# Altium footprint library Connector.PcbLib: 272 footprints (part 11 of 17)
Each footprint in its own frame and in the unit in brackets; x right, y up, seen from the top. Pads: shape width x height; smd on the part's side, far side on the other; paste and mask are expansions set on the pad; w line width, h text height; cw(c..) or ccw(c..) is an arc to the next point about the centre after c.
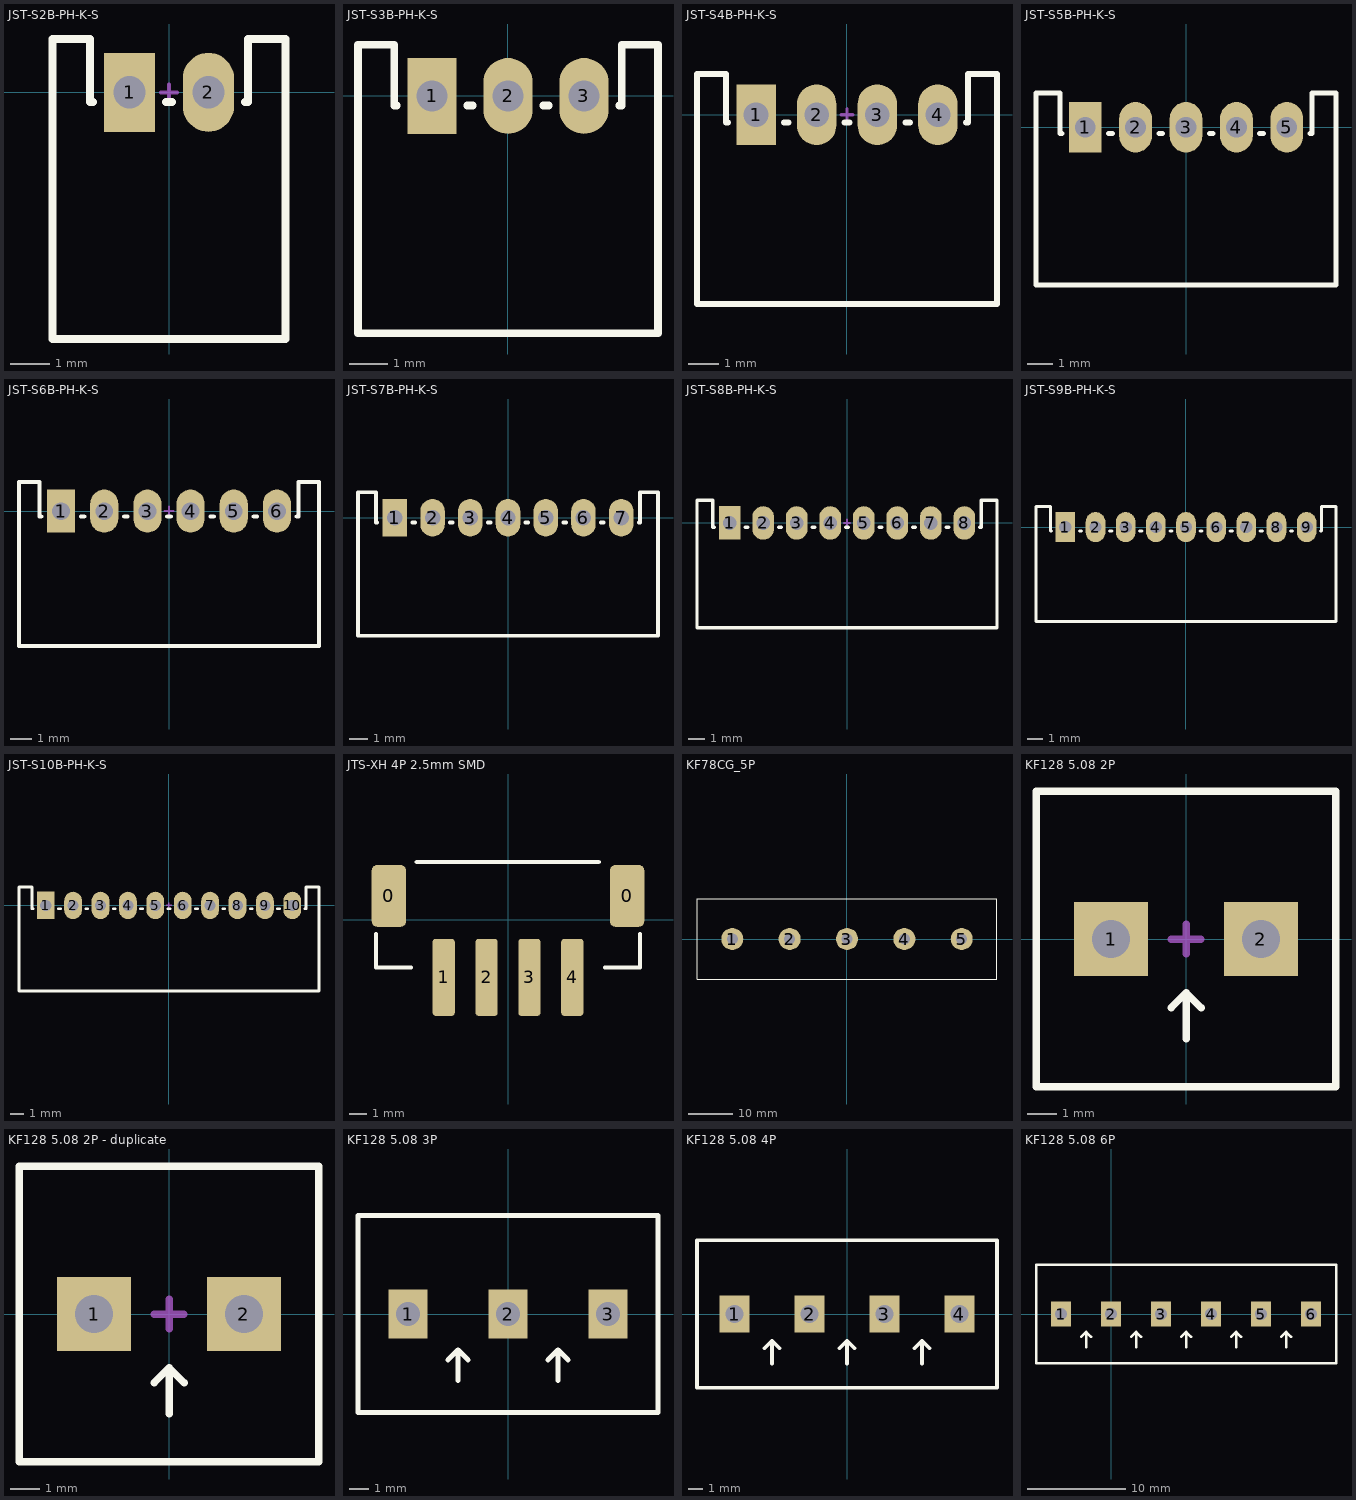
[diagram p10: the footprints below, top view; thin cyan lines are the x and y axes]

## JST-S2B-PH-K-S [mm]
pads (2):
  rect 1.3x2 hole 0.82: 1(-1,0)
  oval 1.3x2 hole 0.82: 2(1,0)
Top Overlay:
  lines w0.2: -1.925,-0.25 -2,-0.25 -2,1.35 -2.95,1.35 -2.95,-6.25 2.95,-6.25 2.95,1.35 2,1.35 2,-0.25 1.925,-0.25 ; -0.075,-0.25 0.075,-0.25
Top Designator:
  text ".Designator" at -3.71,-2.794 h1.52
Mechanical 15:
  lines w0.1: -0.2,0 0.2,0 ; 0,-0.2 0,0.2
3D body "JST-S2B-PH-K-S.STEP": height 4.81, standoff -3.39, extent -2.95,-6.25 2.95,1.35

## JST-S3B-PH-K-S [mm]
pads (3):
  rect 1.3x2 hole 0.82: 1(-2,0)
  oval 1.3x2 hole 0.82: 2(0,0) 3(2,0)
Top Overlay:
  lines w0.2: -2.925,-0.25 -3,-0.25 -3,1.35 -3.95,1.35 -3.95,-6.25 3.95,-6.25 3.95,1.35 3,1.35 3,-0.25 2.925,-0.25 ; -1.075,-0.25 -0.925,-0.25 ; 0.925,-0.25 1.075,-0.25
Top Designator:
  text ".Designator" at -3.71,-2.794 h1.52
Mechanical 15:
  lines w0.1: -0.2,0 0.2,0 ; 0,-0.2 0,0.2
3D body "JST-S3B-PH-K-S.STEP": height 4.81, standoff -3.39, extent -3.95,-6.25 3.95,1.35

## JST-S4B-PH-K-S [mm]
pads (4):
  rect 1.3x2 hole 0.82: 1(-3,0)
  oval 1.3x2 hole 0.82: 2(-1,0) 3(1,0) 4(3,0)
Top Overlay:
  lines w0.2: -3.925,-0.25 -4,-0.25 -4,1.35 -4.95,1.35 -4.95,-6.25 4.95,-6.25 4.95,1.35 4,1.35 4,-0.25 3.925,-0.25 ; -2.075,-0.25 -1.925,-0.25 ; -0.075,-0.25 0.075,-0.25 ; 1.925,-0.25 2.075,-0.25
Top Designator:
  text ".Designator" at -3.71,-2.794 h1.52
Mechanical 15:
  lines w0.1: -0.2,0 0.2,0 ; 0,-0.2 0,0.2
3D body "JST-S4B-PH-K-S.STEP": height 4.81, standoff -3.39, extent -4.95,-6.25 4.95,1.35

## JST-S5B-PH-K-S [mm]
pads (5):
  rect 1.3x2 hole 0.82: 1(-4,0)
  oval 1.3x2 hole 0.82: 2(-2,0) 3(0,0) 4(2,0) 5(4,0)
Top Overlay:
  lines w0.2: -4.925,-0.25 -5,-0.25 -5,1.35 -5.95,1.35 -5.95,-6.25 5.95,-6.25 5.95,1.35 5,1.35 5,-0.25 4.925,-0.25 ; -3.075,-0.25 -2.925,-0.25 ; -1.075,-0.25 -0.925,-0.25 ; 0.925,-0.25 1.075,-0.25 ; 2.925,-0.25 3.075,-0.25
Top Designator:
  text ".Designator" at -3.71,-2.794 h1.52
Mechanical 15:
  lines w0.1: -0.2,0 0.2,0 ; 0,-0.2 0,0.2
3D body "JST-S5B-PH-K-S.STEP": height 4.81, standoff -3.39, extent -5.95,-6.25 5.95,1.35

## JST-S6B-PH-K-S [mm]
pads (6):
  rect 1.3x2 hole 0.82: 1(-5,0)
  oval 1.3x2 hole 0.82: 2(-3,0) 3(-1,0) 4(1,0) 5(3,0) 6(5,0)
Top Overlay:
  lines w0.2: -5.925,-0.25 -6,-0.25 -6,1.35 -6.95,1.35 -6.95,-6.25 6.95,-6.25 6.95,1.35 6,1.35 6,-0.25 5.925,-0.25 ; -4.075,-0.25 -3.925,-0.25 ; -2.075,-0.25 -1.925,-0.25 ; -0.075,-0.25 0.075,-0.25 ; 1.925,-0.25 2.075,-0.25 ; 3.925,-0.25 4.075,-0.25
Top Designator:
  text ".Designator" at -3.71,-2.794 h1.52
Mechanical 15:
  lines w0.1: -0.2,0 0.2,0 ; 0,-0.2 0,0.2
3D body "JST-S6B-PH-K-S.STEP": height 4.81, standoff -3.39, extent -6.95,-6.25 6.95,1.35

## JST-S7B-PH-K-S [mm]
pads (7):
  rect 1.3x2 hole 0.82: 1(-6,0)
  oval 1.3x2 hole 0.82: 2(-4,0) 3(-2,0) 4(0,0) 5(2,0) 6(4,0) 7(6,0)
Top Overlay:
  lines w0.2: -6.925,-0.25 -7,-0.25 -7,1.35 -7.95,1.35 -7.95,-6.25 7.95,-6.25 7.95,1.35 7,1.35 7,-0.25 6.925,-0.25 ; -5.075,-0.25 -4.925,-0.25 ; -3.075,-0.25 -2.925,-0.25 ; -1.075,-0.25 -0.925,-0.25 ; 0.925,-0.25 1.075,-0.25 ; 2.925,-0.25 3.075,-0.25 ; 4.925,-0.25 5.075,-0.25
Top Designator:
  text ".Designator" at -3.71,-2.794 h1.52
Mechanical 15:
  lines w0.1: -0.2,0 0.2,0 ; 0,-0.2 0,0.2
3D body "JST-S7B-PH-K-S.STEP": height 4.81, standoff -3.39, extent -7.95,-6.25 7.95,1.35

## JST-S8B-PH-K-S [mm]
pads (8):
  rect 1.3x2 hole 0.82: 1(-7,0)
  oval 1.3x2 hole 0.82: 2(-5,0) 3(-3,0) 4(-1,0) 5(1,0) 6(3,0) 7(5,0) 8(7,0)
Top Overlay:
  lines w0.2: -7.925,-0.25 -8,-0.25 -8,1.35 -8.95,1.35 -8.95,-6.25 8.95,-6.25 8.95,1.35 8,1.35 8,-0.25 7.925,-0.25 ; -6.075,-0.25 -5.925,-0.25 ; -4.075,-0.25 -3.925,-0.25 ; -2.075,-0.25 -1.925,-0.25 ; -0.075,-0.25 0.075,-0.25 ; 1.925,-0.25 2.075,-0.25 ; 3.925,-0.25 4.075,-0.25 ; 5.925,-0.25 6.075,-0.25
Top Designator:
  text ".Designator" at -3.71,-2.794 h1.52
Mechanical 15:
  lines w0.1: -0.2,0 0.2,0 ; 0,-0.2 0,0.2
3D body "JST-S8B-PH-K-S.STEP": height 4.81, standoff -3.39, extent -8.95,-6.25 8.95,1.35

## JST-S9B-PH-K-S [mm]
pads (9):
  rect 1.3x2 hole 0.82: 1(-8,0)
  oval 1.3x2 hole 0.82: 2(-6,0) 3(-4,0) 4(-2,0) 5(0,0) 6(2,0) 7(4,0) 8(6,0) 9(8,0)
Top Overlay:
  lines w0.2: -8.925,-0.25 -9,-0.25 -9,1.35 -9.95,1.35 -9.95,-6.25 9.95,-6.25 9.95,1.35 9,1.35 9,-0.25 8.925,-0.25 ; -7.075,-0.25 -6.925,-0.25 ; -5.075,-0.25 -4.925,-0.25 ; -3.075,-0.25 -2.925,-0.25 ; -1.075,-0.25 -0.925,-0.25 ; 0.925,-0.25 1.075,-0.25 ; 2.925,-0.25 3.075,-0.25 ; 4.925,-0.25 5.075,-0.25 ; 6.925,-0.25 7.075,-0.25
Top Designator:
  text ".Designator" at -3.71,-2.794 h1.52
Mechanical 15:
  lines w0.1: -0.2,0 0.2,0 ; 0,-0.2 0,0.2
3D body "JST-S9B-PH-K-S.STEP": height 4.81, standoff -3.39, extent -9.95,-6.25 9.95,1.35

## JST-S10B-PH-K-S [mm]
pads (10):
  rect 1.3x2 hole 0.82: 1(-9,0)
  oval 1.3x2 hole 0.82: 2(-7,0) 3(-5,0) 4(-3,0) 5(-1,0) 6(1,0) 7(3,0) 8(5,0) 9(7,0) 10(9,0)
Top Overlay:
  lines w0.2: -9.925,-0.25 -10,-0.25 -10,1.35 -10.95,1.35 -10.95,-6.25 10.95,-6.25 10.95,1.35 10,1.35 10,-0.25 9.925,-0.25 ; -8.075,-0.25 -7.925,-0.25 ; -6.075,-0.25 -5.925,-0.25 ; -4.075,-0.25 -3.925,-0.25 ; -2.075,-0.25 -1.925,-0.25 ; -0.075,-0.25 0.075,-0.25 ; 1.925,-0.25 2.075,-0.25 ; 3.925,-0.25 4.075,-0.25 ; 5.925,-0.25 6.075,-0.25 ; 7.925,-0.25 8.075,-0.25
Top Designator:
  text ".Designator" at -3.71,-2.794 h1.52
Mechanical 15:
  lines w0.1: -0.2,0 0.2,0 ; 0,-0.2 0,0.2
3D body "JST-S10B-PH-K-S.STEP": height 4.81, standoff -3.39, extent -10.95,-6.25 10.95,1.35

## JTS-XH 4P 2.5mm SMD [mm] "1x4P 4P XH 1 2.5mm 4 Brass SMD,P=2.54mm Wire To Board Connector ROHS"
pads (6):
  rrect30% 2x3.6 smd: 0(-6.95,1.375) 0(6.95,1.375)
  rrect30% 1.3x4.5 smd: 1(-3.75,-3.375) 2(-1.25,-3.375) 3(1.25,-3.375) 4(3.75,-3.375)
Top Overlay:
  lines w0.254: -7.7,-0.85 -7.7,-2.8 -5.662,-2.8 ; -5.327,3.35 5.3,3.35 ; 5.662,-2.8 7.7,-2.8 7.7,-0.85
Top Designator:
  text ".Designator" at -3.71,-0.344 h1.52
3D body "JST-XH_4V_SMD.step": height 7.8, standoff 0.05, extent -7.4,-5.049 7.6,3.35

## KF78CG_5P [mm] "KF78CG 13mm 600V 40A"
pads (5):
  round 5 hole 2.5: 1(-26,0) 2(-13,0) 3(0,0) 4(13,0) 5(26,0)
Top Overlay:
  lines w0.254: -34,-9.1 -34,9.1 34,9.1 34,-9.1 -34,-9.1

## KF128 5.08 2P [mm]
pads (2):
  rect 2.5x2.5 hole 1.3: 1(-2.54,0) 2(2.54,0)
Top Overlay:
  lines w0.254: -0.508,-2.324 0,-1.816 ; 0,-3.378 0,-1.816 ; 0.508,-2.324 0,-1.816 ; -5.08,-5 -5.08,5 5.08,5 5.08,-5 -5.08,-5
Top Designator:
  text ".Designator" at -3.947,-0.344 h1.52
Mechanical 15:
  lines w0.254: -0.5,0 0.5,0 ; 0,-0.5 0,0.5
3D body "KF128-5.08-2P.STEP": height 14.16, standoff -3.79, extent -5.68,-5.15 5.08,5.15

## KF128 5.08 2P - duplicate [mm]
height 10
pads (2):
  rect 2.5x2.5 hole 1.3: 1(-2.54,0) 2(2.54,0)
Top Overlay:
  lines w0.254: -0.508,-2.324 0,-1.816 ; 0,-3.378 0,-1.816 ; 0.508,-2.324 0,-1.816 ; -5.08,-5 5.08,-5 5.08,5 -5.08,5 -5.08,-5
Top Designator:
  text ".Designator" at -3.947,-0.344 h1.52
Mechanical 15:
  lines w0.254: -0.5,0 0.5,0 ; 0,-0.5 0,0.5
3D body "KF128-5.08-2P.STEP": height 14.16, standoff -3.79, extent -5.68,-5.15 5.08,5.15

## KF128 5.08 3P [mm]
pads (3):
  rect 2x2.5 hole 1.2: 1(-5.08,0) 2(0,0) 3(5.08,0)
Top Overlay:
  lines w0.254: -3.048,-2.324 -2.54,-1.816 ; -2.54,-3.378 -2.54,-1.816 ; -2.032,-2.324 -2.54,-1.816 ; 2.032,-2.324 2.54,-1.816 ; 2.54,-3.378 2.54,-1.816 ; 3.048,-2.324 2.54,-1.816 ; -7.62,-5 7.62,-5 7.62,5 -7.62,5 -7.62,-5
Top Designator:
  text ".Designator" at -3.947,-0.344 h1.52
3D body "KF128-5.08_3P.STEP": height 14.16, standoff -3.79, extent -8.22,-5.15 7.62,5.15

## KF128 5.08 4P [mm]
height 7.62
pads (4):
  rect 2x2.5 hole 1.2: 1(-7.62,0) 2(-2.54,0) 3(2.54,0) 4(7.62,0)
Top Overlay:
  lines w0.254: -5.588,-2.324 -5.08,-1.816 ; -5.08,-3.378 -5.08,-1.816 ; -4.572,-2.324 -5.08,-1.816 ; -0.508,-2.324 0,-1.816 ; 0,-3.378 0,-1.816 ; 0.508,-2.324 0,-1.816 ; 4.572,-2.324 5.08,-1.816 ; 5.08,-3.378 5.08,-1.816 ; 5.588,-2.324 5.08,-1.816 ; -10.16,-5 10.16,-5 10.16,5 -10.16,5 -10.16,-5
Top Designator:
  text ".Designator" at -3.947,-0.344 h1.52
3D body "KF128-5.08-4P.STEP": height 14.16, standoff -3.79, extent -10.76,-5.15 10.16,5.15

## KF128 5.08 6P [mm]
height 7.62
pads (6):
  rect 2x2.5 hole 1.2: 1(-5.08,0) 2(0,0) 3(5.08,0) 4(10.16,0) 5(15.24,0) 6(20.32,0)
Top Overlay:
  lines w0.254: -3.048,-2.324 -2.54,-1.816 ; -2.54,-3.378 -2.54,-1.816 ; -2.032,-2.324 -2.54,-1.816 ; 2.032,-2.324 2.54,-1.816 ; 2.54,-3.378 2.54,-1.816 ; 3.048,-2.324 2.54,-1.816 ; 7.112,-2.324 7.62,-1.816 ; 7.62,-3.378 7.62,-1.816 ; 8.128,-2.324 7.62,-1.816 ; 12.192,-2.324 12.7,-1.816 ; 12.7,-3.378 12.7,-1.816 ; 13.208,-2.324 12.7,-1.816 ; 17.272,-2.324 17.78,-1.816 ; 17.78,-3.378 17.78,-1.816 ; 18.288,-2.324 17.78,-1.816 ; -7.62,-5 22.86,-5 22.86,5 -7.62,5 -7.62,-5
Top Designator:
  text ".Designator" at 3.673,-0.344 h1.52
3D body "KF128-5.08-2P.STEP": height 14.16, standoff -3.79, extent 12.1,-5.15 22.86,5.15
3D body "KF128-5.08-4P.STEP": height 14.16, standoff -3.79, extent -8.22,-5.15 12.7,5.15